# Altium schematic symbol library EEEFK1E221GV.SchLib: 1 symbol
Pins are listed as number, name and electrical type; pins without a type are passive.

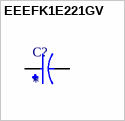
[diagram p0: symbol EEEFK1E221GV]

## EEEFK1E221GV
designator C?
CAP ALUM 220UF 20% 25V SMD; MF: Panasonic; MP: EEEFK1E221GV; Value: *; Package: RADIAL-2 Panasonic; Purchase-URL: https://pricing.snapeda.com/search/part/EEEFK1E221GV/?ref=eda; Check_prices: https://www.snapeda.com/parts/EEEFK1E221GV/Panasonic/view-part/?ref=eda; Price: None; Availability: In Stock; SnapEDA_Link: https://www.snapeda.com/parts/EEEFK1E221GV/Panasonic/view-part/?ref=snap
footprint CAP_EEEFK1E221GV
pins: 1, 2